# Altium schematic symbol library ERA3AEB201V.SchLib: 1 symbol
Pins are listed as number, name and electrical type; pins without a type are passive.

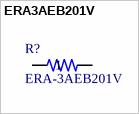
[diagram p0: symbol ERA3AEB201V]

## ERA3AEB201V
designator R?, comment ERA-3AEB201V
200 Ohms ±0.1% 0.1W, 1/10W Chip Resistor 0603 (1608 Metric) Automotive AEC-Q200 Thin Film; MP: ERA3AEB201V; Package: None; Availability: Unavailable; Price: None; Value: *
footprint RES_ERA3AEB201V
pins: 1, 2